# Altium footprint library IC_Digital.PcbLib: 24 footprints (part 2 of 2)
Each footprint in its own frame and in the unit in brackets; x right, y up, seen from the top. Pads: shape width x height; smd on the part's side, far side on the other; paste and mask are expansions set on the pad; w line width, h text height; cw(c..) or ccw(c..) is an arc to the next point about the centre after c.
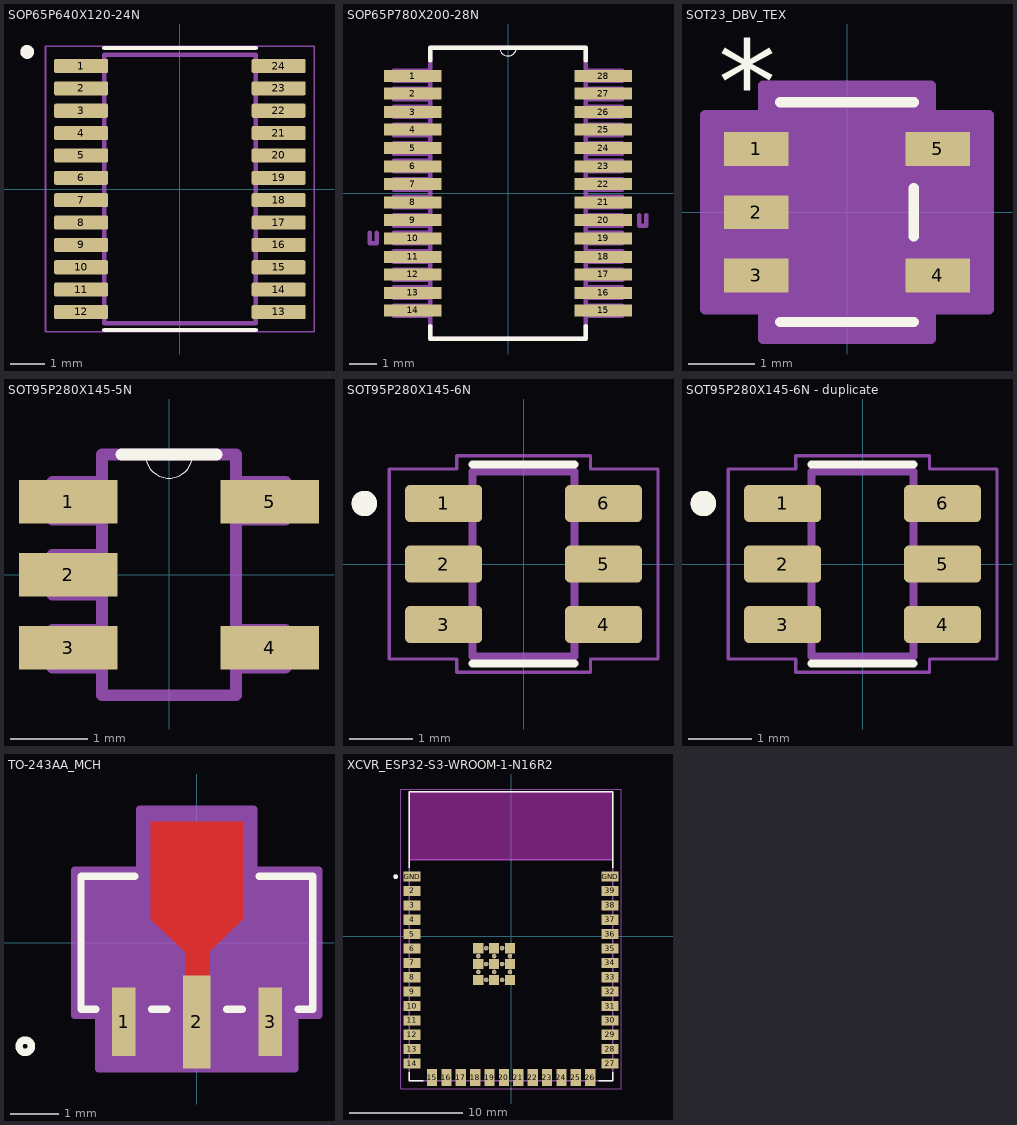
[diagram p1: the footprints below, top view; thin cyan lines are the x and y axes]

## SOP65P640X120-24N [mm]
height 1.2
pads (24):
  rrect25% 1.57x0.41 smd: 1(-2.87,3.575) 2(-2.87,2.925) 3(-2.87,2.275) 4(-2.87,1.625) 5(-2.87,0.975) 6(-2.87,0.325) 7(-2.87,-0.325) 8(-2.87,-0.975) 9(-2.87,-1.625) 10(-2.87,-2.275) 11(-2.87,-2.925) 12(-2.87,-3.575) 13(2.87,-3.575) 14(2.87,-2.925) 15(2.87,-2.275) 16(2.87,-1.625) 17(2.87,-0.975) 18(2.87,-0.325) 19(2.87,0.325) 20(2.87,0.975) 21(2.87,1.625) 22(2.87,2.275) 23(2.87,2.925) 24(2.87,3.575)
Top Overlay:
  circle w0.2: c-4.44,3.985 r0.1
  lines w0.127: -2.2,-4.1 2.2,-4.1 ; -2.2,4.1 2.2,4.1
Mechanical 13:
  circle w0.2: c-4.44,3.985 r0.1
  lines w0.127: -2.2,-3.9 -2.2,3.9 2.2,3.9 2.2,-3.9 -2.2,-3.9
Mechanical 15:
  lines w0.05: -3.905,-4.15 -3.905,4.15 3.905,4.15 3.905,-4.15 -3.905,-4.15
3D body "step_temp.STEP": height 1.2, standoff 0, extent -3.2,-3.9 3.2,3.9

## SOP65P780X200-28N [mil]
pads (28):
  rect 81x17 smd: 1(-135,166) 2(-135,141) 3(-135,115) 4(-135,90) 5(-135,64) 6(-135,38) 7(-135,13) 8(-135,-13) 9(-135,-38) 10(-135,-64) 11(-135,-90) 12(-135,-115) 13(-135,-141) 14(-135,-166) 15(135,-166) 16(135,-141) 17(135,-115) 18(135,-90) 19(135,-64) 20(135,-38) 21(135,-13) 22(135,13) 23(135,38) 24(135,64) 25(135,90) 26(135,115) 27(135,141) 28(135,166)
Top Overlay:
  lines w0: -12,206.08 ccw(c0,206.5) 12,206.92 ; -12,206.08 ccw(c0,206.5) 12,206.92 ; -12,206.08 ccw(c0,206.5) 12,206.92
  lines w6: -110,-188 -110,-206 110,-206 110,-188 ; -110,188 -110,206 -12,206 110,206 110,188
Mechanical 13:
  lines w0: -12,206.08 ccw(c0,206.5) 12,206.92 ; -12,206.08 ccw(c0,206.5) 12,206.92 ; -12,206.08 ccw(c0,206.5) 12,206.92
  lines w6: -196,-56 -196,-71 -186,-71 -186,-56 ; 186,-31 186,-46 196,-46 196,-31 ; -162,-174 -110,-174 -110,-159 -162,-159 -162,-174 ; -162,-148 -110,-148 -110,-133 -162,-133 -162,-148 ; -162,-123 -110,-123 -110,-108 -162,-108 -162,-123 ; -162,-97 -110,-97 -110,-82 -162,-82 -162,-97 ; -162,-71 -110,-71 -110,-56 -162,-56 -162,-71 ; -162,-46 -110,-46 -110,-31 -162,-31 -162,-46 ; -162,-20 -110,-20 -110,-5 -162,-5 -162,-20 ; -162,5 -110,5 -110,20 -162,20 -162,5 ; -162,31 -110,31 -110,46 -162,46 -162,31 ; -162,56 -110,56 -110,71 -162,71 -162,56 ; -162,82 -110,82 -110,97 -162,97 -162,82 ; -162,108 -110,108 -110,123 -162,123 -162,108 ; -162,133 -110,133 -110,148 -162,148 -162,133 ; -162,159 -110,159 -110,174 -162,174 -162,159 ; -110,-206 -110,206 -12,206 110,206 110,-206 -110,-206 ; 110,-174 162,-174 162,-159 110,-159 110,-174 ; 110,-148 162,-148 162,-133 110,-133 110,-148 ; 110,-123 162,-123 162,-108 110,-108 110,-123 ; 110,-97 162,-97 162,-82 110,-82 110,-97 ; 110,-71 162,-71 162,-56 110,-56 110,-71 ; 110,-46 162,-46 162,-31 110,-31 110,-46 ; 110,-20 162,-20 162,-5 110,-5 110,-20 ; 110,5 162,5 162,20 110,20 110,5 ; 110,31 162,31 162,46 110,46 110,31 ; 110,56 162,56 162,71 110,71 110,56 ; 110,82 162,82 162,97 110,97 110,82 ; 110,108 162,108 162,123 110,123 110,108 ; 110,133 162,133 162,148 110,148 110,133 ; 110,159 162,159 162,174 110,174 110,159
  text "*" at -168.03,178.04 h50.01
  text "*" at -168.21,178.22 h50.06
  text "*" at -168.11,178.12 h50.03
3D body "step_temp.STEP": height 78.74, standoff 0, extent -153.54,-200.79 153.54,200.79

## SOT23_DBV_TEX [mil]
pads (5):
  rect 38.28x20 smd paste+0 mask+0: 1(-53.64,37.4) 2(-53.64,0) 3(-53.64,-37.4) 4(53.64,-37.4) 5(53.64,37.4)
Top Overlay:
  lines w6: -39.5,-65 39.5,-65 ; -39.5,65 39.5,65 ; 39.5,-14.3 39.5,14.3
  text "*" at -76.14,52.4 h50
Mechanical 13:
  lines w1: -12,60 ccw(c0,60) 12,60 ; -59,-47.4 -59,-27.4 -34.5,-27.4 -34.5,-47.4 -59,-47.4 ; -59,-10 -59,10 -34.5,10 -34.5,-10 -59,-10 ; -59,27.4 -59,47.4 -34.5,47.4 -34.5,27.4 -59,27.4 ; -34.5,-60 34.5,-60 34.5,60 -34.5,60 -34.5,-60 ; 34.5,-47.4 34.5,-27.4 59,-27.4 59,-47.4 34.5,-47.4 ; 34.5,27.4 34.5,47.4 59,47.4 59,27.4 34.5,27.4
  text "*" at -37,9.4 h50
Mechanical 15:
  region: 49.5,-75 -49.5,-75 -49.5,-57.4 -84,-57.4 -84,57.4 -49.5,57.4 -49.5,75 49.5,75 49.5,57.4 84,57.4 84,-57.4 49.5,-57.4
  lines w6: -84,-57.4 -49.5,-57.4 -49.5,-75 49.5,-75 49.5,-57.4 84,-57.4 84,57.4 49.5,57.4 49.5,75 -49.5,75 -49.5,57.4 -84,57.4 -84,-57.4
3D body "SOT23_DBV_TEX.step": height 57.09, standoff 0, extent -59.02,-60 59.02,60

## SOT95P280X145-5N [mil]
pads (5):
  rect 50x22 smd: 1(-51,37) 2(-51,0) 3(-51,-37) 4(51,-37) 5(51,37)
Top Overlay:
  lines w0: -12,61 ccw(c0,61) 12,61
  lines w6: -24,61 -12,61 12,61 24,61
Mechanical 13:
  lines w0: -12,61 ccw(c0,61) 12,61
  lines w6: -34,-47 -59,-47 -59,-28 -34,-28 ; -34,-47 -34,-28 ; -34,-47 -34,-61 34,-61 34,-47 ; -34,-28 -34,-10 ; -34,-10 -59,-10 -59,10 -34,10 ; -34,-10 -34,10 ; -34,10 -34,28 ; -34,28 -59,28 -59,47 -34,47 ; -34,28 -34,47 ; -34,47 -34,61 -12,61 12,61 34,61 34,47 ; 34,-47 59,-47 59,-28 34,-28 ; 34,-47 34,-28 ; 34,-28 34,28 ; 34,28 59,28 59,47 34,47 ; 34,28 34,47
3D body "step_temp.STEP": height 57.09, standoff 0, extent -53.15,-57.09 53.15,57.09

## SOT95P280X145-6N [mm]
pads (6):
  rrect25% 1.21x0.58 smd: 1(-1.255,0.95) 2(-1.255,0) 3(-1.255,-0.95) 4(1.255,-0.95) 5(1.255,0) 6(1.255,0.95)
Top Overlay:
  circle w0.2: c-2.5,0.95 r0.1
  lines w0.127: -0.8,-1.56 0.8,-1.56 ; -0.8,1.56 0.8,1.56
Mechanical 13:
  circle w0.2: c-2.5,0.95 r0.1
  lines w0.127: -0.8,-1.45 -0.8,1.45 0.8,1.45 0.8,-1.45 -0.8,-1.45
Mechanical 15:
  lines w0.05: -2.11,-1.49 -2.11,1.49 -1.05,1.49 -1.05,1.7 1.05,1.7 1.05,1.49 2.11,1.49 2.11,-1.49 1.05,-1.49 1.05,-1.7 -1.05,-1.7 -1.05,-1.49 -2.11,-1.49
3D body "step_temp.STEP": height 1.45, standoff 0, extent -1.4,-1.45 1.4,1.45

## SOT95P280X145-6N - duplicate [mm]
pads (6):
  rrect25% 1.21x0.58 smd: 1(-1.255,0.95) 2(-1.255,0) 3(-1.255,-0.95) 4(1.255,-0.95) 5(1.255,0) 6(1.255,0.95)
Top Overlay:
  circle w0.2: c-2.5,0.95 r0.1
  lines w0.127: -0.8,-1.56 0.8,-1.56 ; -0.8,1.56 0.8,1.56
Mechanical 13:
  circle w0.2: c-2.5,0.95 r0.1
  lines w0.127: -0.8,-1.45 -0.8,1.45 0.8,1.45 0.8,-1.45 -0.8,-1.45
Mechanical 15:
  lines w0.05: -2.11,-1.49 -2.11,1.49 -1.05,1.49 -1.05,1.7 1.05,1.7 1.05,1.49 2.11,1.49 2.11,-1.49 1.05,-1.49 1.05,-1.7 -1.05,-1.7 -1.05,-1.49 -2.11,-1.49
3D body "step_temp.STEP": height 1.45, standoff 0, extent -1.4,-1.45 1.4,1.45

## TO-243AA_MCH [mm]
pads (3):
  rect 0.48x1.403 smd paste+0 mask+0: 1(-1.5,-1.623) 3(1.5,-1.623)
  rect 0.56x1.9 smd paste+0 mask+0: 2(0,-1.623)
Top Layer:
  region: 0.24,-1.232 -0.24,-1.232 -0.24,-0.191 -0.94,0.484 -0.94,2.476 -0.483,2.476 0.483,2.476 0.94,2.476 0.94,0.484 0.24,-0.191
Top Overlay:
  circle w0.152: c-3.518,-2.121 r0.127
  lines w0.152: -2.073,-1.359 -2.375,-1.359 -2.375,1.359 -1.273,1.359 ; -0.927,-1.359 -0.613,-1.359 ; 0.613,-1.359 0.927,-1.359 ; 1.273,1.359 2.375,1.359 2.375,-1.359 2.073,-1.359
Top Paste:
  region: 0.24,-1.232 -0.24,-1.232 -0.24,-0.191 -0.94,0.484 -0.94,2.476 0.94,2.476 0.94,0.484 0.24,-0.191
Top Solder:
  region: 0.24,-1.232 -0.24,-1.232 -0.24,-0.191 -0.94,0.484 -0.94,2.476 0.94,2.476 0.94,0.484 0.24,-0.191
Mechanical 13:
  circle w0: c-1.994,-0.978 r0.127
  lines w0.025: -2.248,-1.232 2.248,-1.232 2.248,1.232 -2.248,1.232 -2.248,-1.232 ; -1.74,-2.432 -1.74,-1.232 -1.26,-1.232 -1.26,-2.432 -1.74,-2.432 ; -0.24,-2.432 -0.24,-1.232 0.24,-1.232 0.24,-2.432 -0.24,-2.432 ; 1.26,-2.432 1.26,-1.232 1.74,-1.232 1.74,-2.432 1.26,-2.432
Mechanical 15:
  region: -2.502,-1.486 -2.502,1.486 -1.169,1.486 -1.169,2.73 1.169,2.73 1.169,1.486 2.502,1.486 2.502,-1.486 2.008,-1.486 2.008,-2.578 -2.008,-2.578 -2.008,-1.486
  lines w0.152: -2.502,-1.486 -2.502,1.486 -1.169,1.486 -1.169,2.73 1.169,2.73 1.169,1.486 2.502,1.486 2.502,-1.486 2.008,-1.486 2.008,-2.578 -2.008,-2.578 -2.008,-1.486 -2.502,-1.486

## XCVR_ESP32-S3-WROOM-1-N16R2 [mm]
height 3.25
pads (61):
  rect 1.5x0.9 smd: 2(-8.75,3.99) 3(-8.75,2.72) 4(-8.75,1.45) 5(-8.75,0.18) 6(-8.75,-1.09) 7(-8.75,-2.36) 8(-8.75,-3.63) 9(-8.75,-4.9) 10(-8.75,-6.17) 11(-8.75,-7.44) 12(-8.75,-8.71) 13(-8.75,-9.98) 14(-8.75,-11.25) 27(8.75,-11.25) 28(8.75,-9.98) 29(8.75,-8.71) 30(8.75,-7.44) 31(8.75,-6.17) 32(8.75,-4.9) 33(8.75,-3.63) 34(8.75,-2.36) 35(8.75,-1.09) 36(8.75,0.18) 37(8.75,1.45) 38(8.75,2.72) 39(8.75,3.99) GND(-8.75,5.26) GND(8.75,5.26)
  rect 0.9x1.5 smd: 15(-6.985,-12.5) 16(-5.715,-12.5) 17(-4.445,-12.5) 18(-3.175,-12.5) 19(-1.905,-12.5) 20(-0.635,-12.5) 21(0.635,-12.5) 22(1.905,-12.5) 23(3.175,-12.5) 24(4.445,-12.5) 25(5.715,-12.5) 26(6.985,-12.5)
  round 0.4 hole 0.2 mask+0: 41_10(-1.5,-1.76) 41_11(-2.9,-1.76) 41_12(-0.1,-1.76) 41_13(-2.9,-3.16) 41_14(-1.5,-3.16) 41_15(-0.1,-3.16) 41_16(-2.2,-1.06) 41_17(-0.8,-1.06) 41_18(-2.2,-2.46) 41_19(-0.8,-2.46) 41_20(-2.2,-3.86) 41_21(-0.8,-3.86)
  rect 0.9x0.9 smd: GND(-2.9,-3.86) GND(-2.9,-2.46) GND(-2.9,-1.06) GND(-1.5,-3.86) GND(-1.5,-2.46) GND(-1.5,-1.06) GND(-0.1,-3.86) GND(-0.1,-2.46) GND(-0.1,-1.06)
Top Overlay:
  circle w0.2: c-10.2,5.26 r0.1
  lines w0.127: -9,-12.02 -9,-12.75 -7.755,-12.75 ; -9,6.03 -9,12.75 9,12.75 9,6.03 ; 7.755,-12.75 9,-12.75 9,-12.02
Keep-Out Layer:
  region: 9,6.75 -9,6.75 -9,12.75 9,12.75
  region: 9,6.75 -9,6.75 -9,12.75 9,12.75
Mechanical 13:
  circle w0.2: c-10.2,5.26 r0.1
  lines w0.127: -9,6.75 9,6.75 ; -9,6.75 -9,12.75 9,12.75 9,6.75 ; -9,6.75 -9,-12.75 9,-12.75 9,6.75
  text "ANTENNA" at -4.5,9.5 h1.27
Mechanical 15:
  lines w0.05: -9.75,-13.5 9.75,-13.5 9.75,13 -9.75,13 -9.75,-13.5
3D body "step_temp.STEP": height 3.25, standoff 0, extent -9,-12.75 9,12.75